# Altium schematic symbol library L78L05A(UMW).Schlib: 1 symbol
Pins are listed as number, name and electrical type; pins without a type are passive.

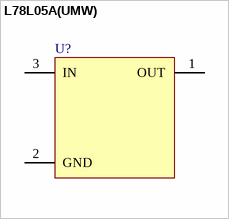
[diagram p0: symbol L78L05A(UMW)]

## L78L05A(UMW)
designator U?
pins: 1 OUT, 2 GND, 3 IN